# Altium footprint library CoilcraftPCB.PcbLib: 320 footprints (part 20 of 20)
Each footprint in its own frame and in the unit in brackets; x right, y up, seen from the top. Pads: shape width x height; smd on the part's side, far side on the other; paste and mask are expansions set on the pad; w line width, h text height; cw(c..) or ccw(c..) is an arc to the next point about the centre after c.
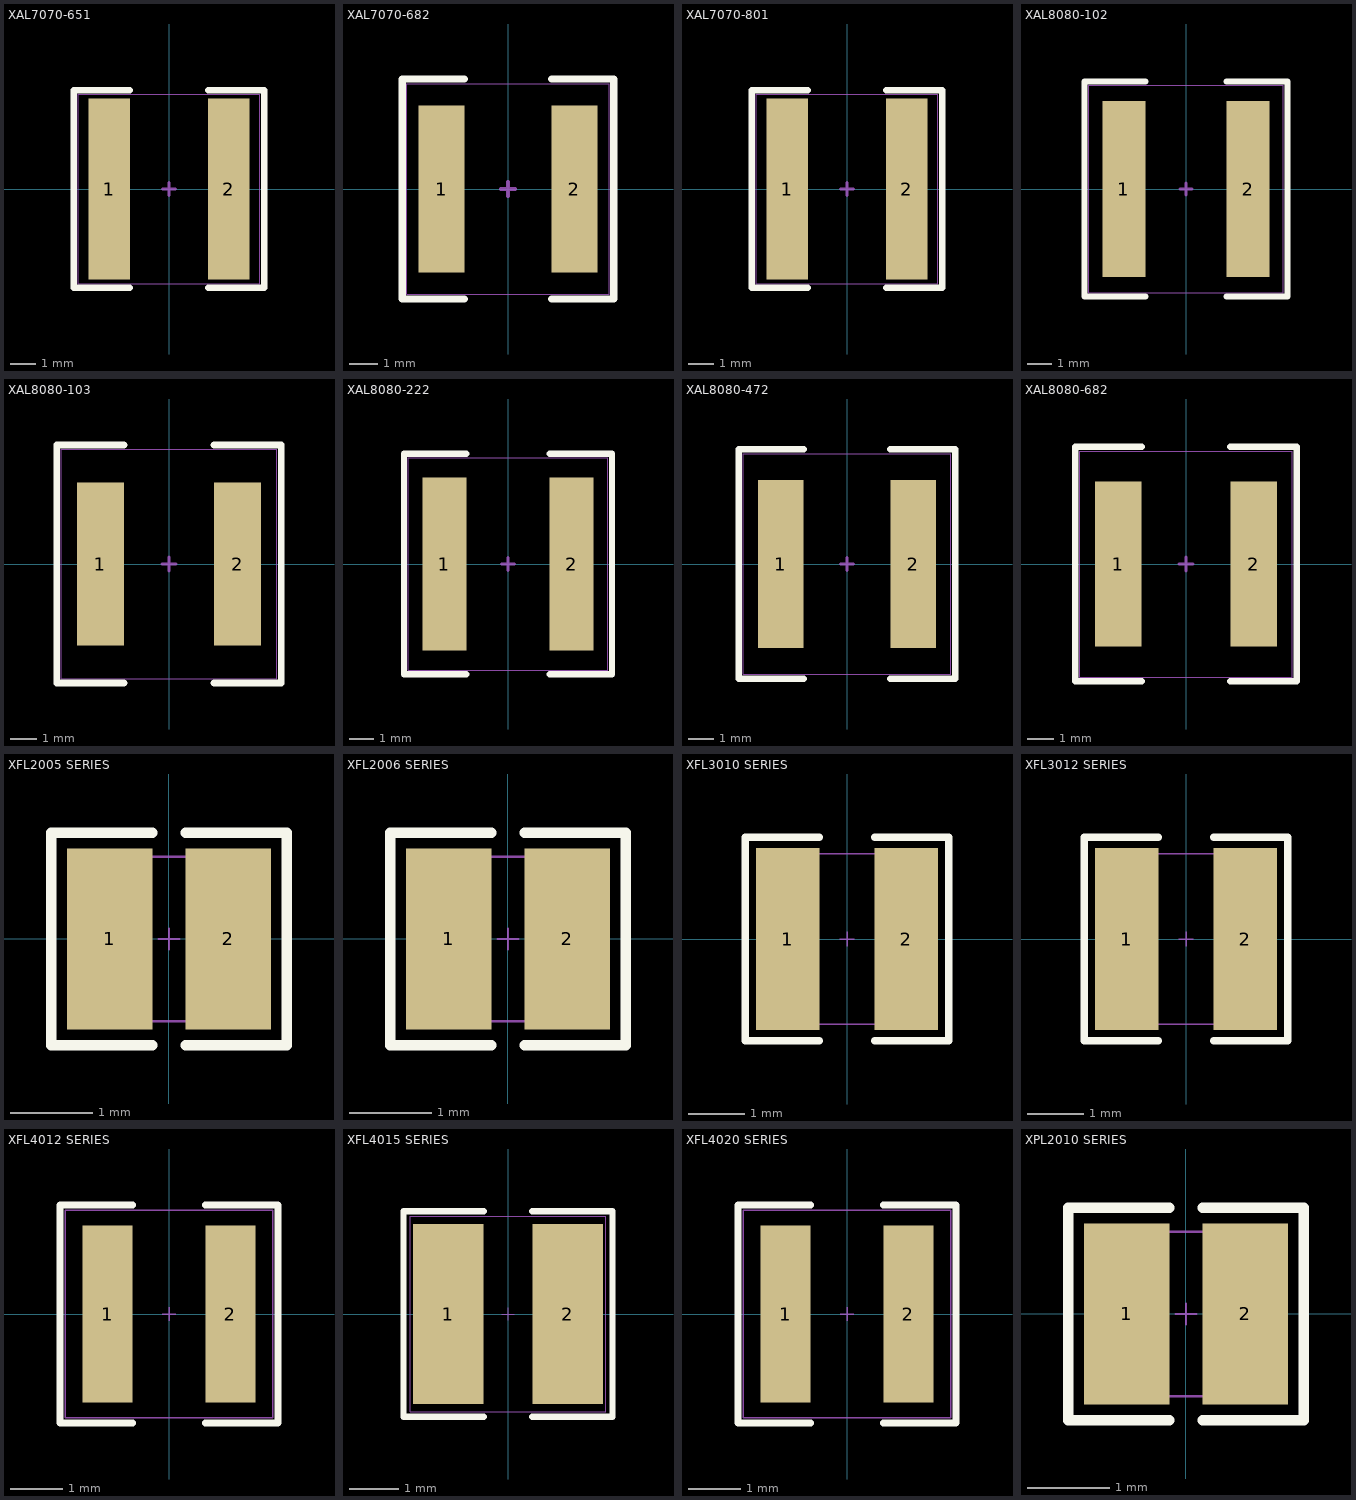
[diagram p19: the footprints below, top view; thin cyan lines are the x and y axes]

## XAL7070-651 [mil] "Coilcraft High Temperature Shielded Power Inductors"
height 276
pads (2):
  rect 64x281 smd: 1(-93,0) 2(93,0)
Top Overlay:
  lines w10: -61,-154 -148,-154 -148,154 -61,154 ; 61,-154 148,-154 148,154 61,154
Mechanical 13:
  lines w5: -10,0 10,0 ; 0,-10 0,10
Mechanical 14:
  lines w1: -141.5,-147.5 141.5,-147.5 141.5,147.5 -141.5,147.5 -141.5,-147.5
3D body: height 275.65, standoff 0.06, extent -151.58,-157.48 151.57,157.48

## XAL7070-682 [mil] "Coilcraft High Temperature Shielded Power Inductors"
height 276
pads (2):
  rect 64x234 smd: 1(-93,0) 2(93,0)
Top Overlay:
  lines w10: -61,-154 -148,-154 -148,154 -61,154 ; 61,-154 148,-154 148,154 61,154
Mechanical 13:
  lines w5: -10,0 10,0 ; 0,-10 0,10
Mechanical 14:
  lines w1: -141.5,-147.5 -141.5,147.5 141.5,147.5 141.5,-147.5 -141.5,-147.5
3D body: height 275.65, standoff 0.06, extent -151.58,-157.48 151.57,157.48

## XAL7070-801 [mil] "Coilcraft High Temperature Shielded Power Inductors"
height 276
pads (2):
  rect 64x281 smd: 1(-93,0) 2(93,0)
Top Overlay:
  lines w10: -61,-154 -148,-154 -148,154 -61,154 ; 61,-154 148,-154 148,154 61,154
Mechanical 13:
  lines w5: -10,0 10,0 ; 0,-10 0,10
Mechanical 14:
  lines w1: -141.5,-147.5 -141.5,147.5 141.5,147.5 141.5,-147.5 -141.5,-147.5
3D body: height 275.65, standoff 0.06, extent -151.58,-157.48 151.57,157.48

## XAL8080-102 [mil] "Coilcraft High Temperature Shielded Power Inductors"
height 315
pads (2):
  rect 70x288 smd: 1(-101.5,0) 2(101.5,0)
Top Overlay:
  lines w10: -66.5,-176 -166,-176 -166,176 -66.5,176 ; 66.5,-176 166,-176 166,176 66.5,176
Mechanical 13:
  lines w5: -10,0 10,0 ; 0,-10 0,10
Mechanical 14:
  lines w1: -159.5,-169.5 -159.5,169.5 159.5,169.5 159.5,-169.5 -159.5,-169.5
3D body: height 315.02, standoff 0.06, extent -163.39,-173.23 163.38,173.23

## XAL8080-103 [mil] "Coilcraft High Temperature Shielded Power Inductors"
height 315
pads (2):
  rect 70x241 smd: 1(-101.5,0) 2(101.5,0)
Top Overlay:
  lines w10: -66.5,-176 -166,-176 -166,176 -66.5,176 ; 66.5,-176 166,-176 166,176 66.5,176
Mechanical 13:
  lines w5: -10,0 10,0 ; 0,-10 0,10
Mechanical 14:
  lines w1: -159.5,-169.5 159.5,-169.5 159.5,169.5 -159.5,169.5 -159.5,-169.5
3D body: height 315.02, standoff 0.06, extent -163.39,-173.23 163.38,173.23

## XAL8080-222 [mil] "Coilcraft High Temperature Shielded Power Inductors"
height 315
pads (2):
  rect 70x276 smd: 1(-101.5,0) 2(101.5,0)
Top Overlay:
  lines w10: -66.5,-176 -166,-176 -166,176 -66.5,176 ; 66.5,-176 166,-176 166,176 66.5,176
Mechanical 13:
  lines w5: -10,0 10,0 ; 0,-10 0,10
Mechanical 14:
  lines w1: -159.5,-169.5 -159.5,169.5 159.5,169.5 159.5,-169.5 -159.5,-169.5
3D body: height 315.02, standoff 0.06, extent -163.39,-173.23 163.38,173.23

## XAL8080-472 [mil] "Coilcraft High Temperature Shielded Power Inductors"
height 315
pads (2):
  rect 70x258 smd: 1(-101.5,0) 2(101.5,0)
Top Overlay:
  lines w10: -66.5,-176 -166,-176 -166,176 -66.5,176 ; 66.5,-176 166,-176 166,176 66.5,176
Mechanical 13:
  lines w5: -10,0 10,0 ; 0,-10 0,10
Mechanical 14:
  lines w1: -159.5,-169.5 159.5,-169.5 159.5,169.5 -159.5,169.5 -159.5,-169.5
3D body: height 315.02, standoff 0.06, extent -163.39,-173.23 163.38,173.23

## XAL8080-682 [mil] "Coilcraft High Temperature Shielded Power Inductors"
height 315
pads (2):
  rect 70x247 smd: 1(-101.5,0) 2(101.5,0)
Top Overlay:
  lines w10: -66.5,-176 -166,-176 -166,176 -66.5,176 ; 66.5,-176 166,-176 166,176 66.5,176
Mechanical 13:
  lines w5: -10,0 10,0 ; 0,-10 0,10
Mechanical 14:
  lines w1: -159.5,-169.5 159.5,-169.5 159.5,169.5 -159.5,169.5 -159.5,-169.5
3D body: height 315.02, standoff 0.06, extent -163.39,-173.23 163.38,173.23

## XFL2005 SERIES [mil] "Coilcraft Shielded Power Inductors"
height 20
pads (2):
  rect 41x87 smd: 1(-28.5,0) 2(28.5,0)
Top Overlay:
  lines w5: -8,-51 -56.5,-51 -56.5,51 -8,51 ; 8,-51 56.5,-51 56.5,51 8,51
Mechanical 13:
  lines w1: -5,0 5,0 ; 0,-5 0,5
Mechanical 14:
  lines w1: -37.5,-39.5 -37.5,39.5 37.5,39.5 37.5,-39.5 -37.5,-39.5
3D body: height 19.72, standoff 0.03, extent -43.3,-41.33 43.31,41.34

## XFL2006 SERIES [mil] "Coilcraft Shielded Power Inductors"
height 24
pads (2):
  rect 41x87 smd: 1(-28.5,0) 2(28.5,0)
Top Overlay:
  lines w5: -8,-51 -56.5,-51 -56.5,51 -8,51 ; 8,-51 56.5,-51 56.5,51 8,51
Mechanical 13:
  lines w1: -5,0 5,0 ; 0,-5 0,5
Mechanical 14:
  lines w1: -37.5,-39.5 -37.5,39.5 37.5,39.5 37.5,-39.5 -37.5,-39.5
3D body: height 23.65, standoff 0.03, extent -43.3,-41.33 43.31,41.34

## XFL3010 SERIES [mil] "Coilcraft Shielded Power Inductors"
height 43
pads (2):
  rect 44x126 smd: 1(-41,0) 2(41,0)
Top Overlay:
  lines w5: -19,-70.5 -70.5,-70.5 -70.5,70.5 -19,70.5 ; 19,-70.5 70.5,-70.5 70.5,70.5 19,70.5
Mechanical 13:
  lines w1: -5,0 5,0 ; 0,-5 0,5
Mechanical 14:
  lines w1: -59,-59 -59,59 59,59 59,-59 -59,-59
3D body: height 43.34, standoff 0.03, extent -62.99,-62.99 63,63

## XFL3012 SERIES [mil] "Coilcraft Shielded Power Inductors"
height 51
pads (2):
  rect 44x126 smd: 1(-41,0) 2(41,0)
Top Overlay:
  lines w5: -19,-70.5 -70.5,-70.5 -70.5,70.5 -19,70.5 ; 19,-70.5 70.5,-70.5 70.5,70.5 19,70.5
Mechanical 13:
  lines w1: -5,0 5,0 ; 0,-5 0,5
Mechanical 14:
  lines w1: -59,-59 59,-59 59,59 -59,59 -59,-59
3D body: height 51.21, standoff 0.03, extent -62.99,-62.99 63,63

## XFL4012 SERIES [mil] "Coilcraft Shielded Power Inductors"
height 47
pads (2):
  rect 38x134 smd: 1(-46.5,0) 2(46.5,0)
Top Overlay:
  lines w5: -27.5,-82.5 -82.5,-82.5 -82.5,82.5 -27.5,82.5 ; 27.5,-82.5 82.5,-82.5 82.5,82.5 27.5,82.5
Mechanical 13:
  lines w1: -5,0 5,0 ; 0,-5 0,5
Mechanical 14:
  lines w1: -78.5,-78.5 78.5,-78.5 78.5,78.5 -78.5,78.5 -78.5,-78.5
3D body: height 47.31, standoff 0.06, extent -84.64,-84.64 84.65,84.65

## XFL4015 SERIES [mil] "Coilcraft Shielded Power Inductors"
height 59
pads (2):
  rect 57x145 smd: 1(-48,0) 2(48,0)
Top Overlay:
  lines w5: -19.5,-82.5 -84,-82.5 -84,82.5 -19.5,82.5 ; 19.5,-82.5 84,-82.5 84,82.5 19.5,82.5
Mechanical 13:
  lines w1: -5,0 5,0 ; 0,-5 0,5
Mechanical 14:
  lines w1: -78.5,-78.5 78.5,-78.5 78.5,78.5 -78.5,78.5 -78.5,-78.5
3D body: height 63.06, standoff 0.06, extent -84.64,-84.64 84.65,84.65

## XFL4020 SERIES [mil] "Coilcraft Shielded Power Inductors"
height 83
pads (2):
  rect 38x134 smd: 1(-46.5,0) 2(46.5,0)
Top Overlay:
  lines w5: -27.5,-82.5 -82.5,-82.5 -82.5,82.5 -27.5,82.5 ; 27.5,-82.5 82.5,-82.5 82.5,82.5 27.5,82.5
Mechanical 13:
  lines w1: -5,0 5,0 ; 0,-5 0,5
Mechanical 14:
  lines w1: -78.5,-78.5 78.5,-78.5 78.5,78.5 -78.5,78.5 -78.5,-78.5
3D body: height 83, standoff 0, extent -78.5,-78.5 78.5,78.5

## XPL2010 SERIES [mil] "Coilcraft SMT Power Inductors"
height 39
pads (2):
  rect 41x87 smd: 1(-28.5,0) 2(28.5,0)
Top Overlay:
  lines w5: -8,-51 -56.5,-51 -56.5,51 -8,51 ; 8,-51 56.5,-51 56.5,51 8,51
Mechanical 13:
  lines w1: -5,0 5,0 ; 0,-5 0,5
Mechanical 14:
  lines w1: -37.5,-39.5 37.5,-39.5 37.5,39.5 -37.5,39.5 -37.5,-39.5
3D body: height 51.21, standoff 0.03, extent -43.3,-41.33 43.31,41.34